# EAGLE library part 74HC123PW_118 (library astra)
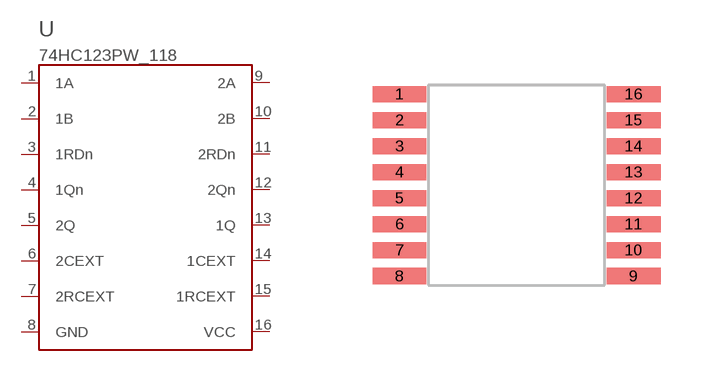
[diagram p13: symbol with the pads of NXP_TSSOP16_MONO; footprint NXP_TSSOP16_MONO]

Designator prefix U

## 74HC123PW_118  [NXP_TSSOP16_MONO]
1  1A  in
2  1B  in
3  1RDn  in
4  1Qn  out
5  2Q  out
6  2CEXT  pas
7  2RCEXT  pas
8  GND  pwr
9  2A  in
10  2B  in
11  2RDn  in
12  2Qn  out
13  1Q  out
14  1CEXT  pas
15  1RCEXT  pas
16  VCC  pwr

## Footprint NXP_TSSOP16_MONO (pad centres in mm)
Nexperia SOT403-1 Fig.2, copper toe span 7.20, heel gap 4.50, land length 1.35, width 0.40.
smd 1.35 x 0.4: 1 -2.925,2.275; 2 -2.925,1.625; 3 -2.925,0.975; 4 -2.925,0.325; 5 -2.925,-0.325; 6 -2.925,-0.975; 7 -2.925,-1.625; 8 -2.925,-2.275; 9 2.925,-2.275; 10 2.925,-1.625; 11 2.925,-0.975; 12 2.925,-0.325; 13 2.925,0.325; 14 2.925,0.975; 15 2.925,1.625; 16 2.925,2.275